# Altium footprint library Components - 27.10.26 - 11.54.PcbLib: 1 footprints
Each footprint in its own frame and in the unit in brackets; x right, y up, seen from the top. Pads: shape width x height; smd on the part's side, far side on the other; paste and mask are expansions set on the pad; w line width, h text height; cw(c..) or ccw(c..) is an arc to the next point about the centre after c.
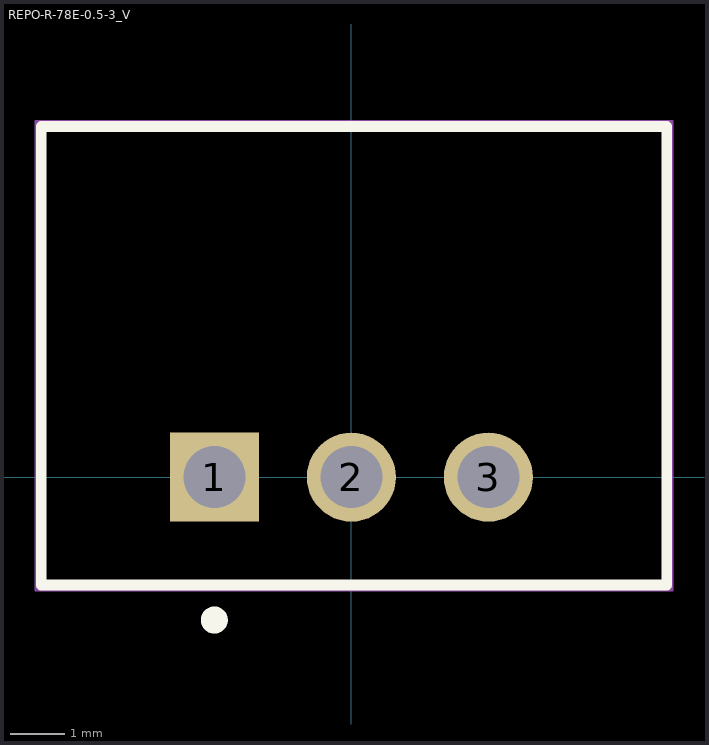
[diagram p0: the footprint, top view; thin cyan lines are the x and y axes]

## REPO-R-78E-0.5-3_V [mm] "THD, 3-Leads, Body 11.6x8.5mm, Pitch 2.54mm"
height 10.4
pads (3):
  rect 1.65x1.65 hole 1.15: 1(-2.54,0)
  round 1.65 hole 1.15: 2(0,0) 3(2.54,0)
Top Overlay:
  circle w0.25: c-2.54,-2.65 r0.125
  lines w0.2: -5.75,-2 5.85,-2 5.85,6.5 -5.75,6.5 -5.75,-2
Mechanical 13:
  lines w0.1: -5.75,-2 -5.75,6.5 5.85,6.5 5.85,-2 -5.75,-2
Mechanical 15:
  lines w0.05: -5.85,-2.1 -5.85,6.6 5.95,6.6 5.95,-2.1 -5.85,-2.1
  lines w0.1: -0.5,0 0.5,0 ; 0,-0.5 0,0.5
3D body: height 0.51, standoff -4.61, extent -0.25,-0.125 0.25,0.125
3D body: height 0.51, standoff -4.61, extent 2.29,-0.125 2.79,0.125
3D body: height 0.51, standoff -4.61, extent -2.79,-0.125 -2.29,0.125
3D body: height 10.4, standoff 0.51, extent -5.749,-1.999 5.849,6.499